# Altium footprint library PcbLib1.PcbLib: 9 footprints
Each footprint in its own frame and in the unit in brackets; x right, y up, seen from the top. Pads: shape width x height; smd on the part's side, far side on the other; paste and mask are expansions set on the pad; w line width, h text height; cw(c..) or ccw(c..) is an arc to the next point about the centre after c.
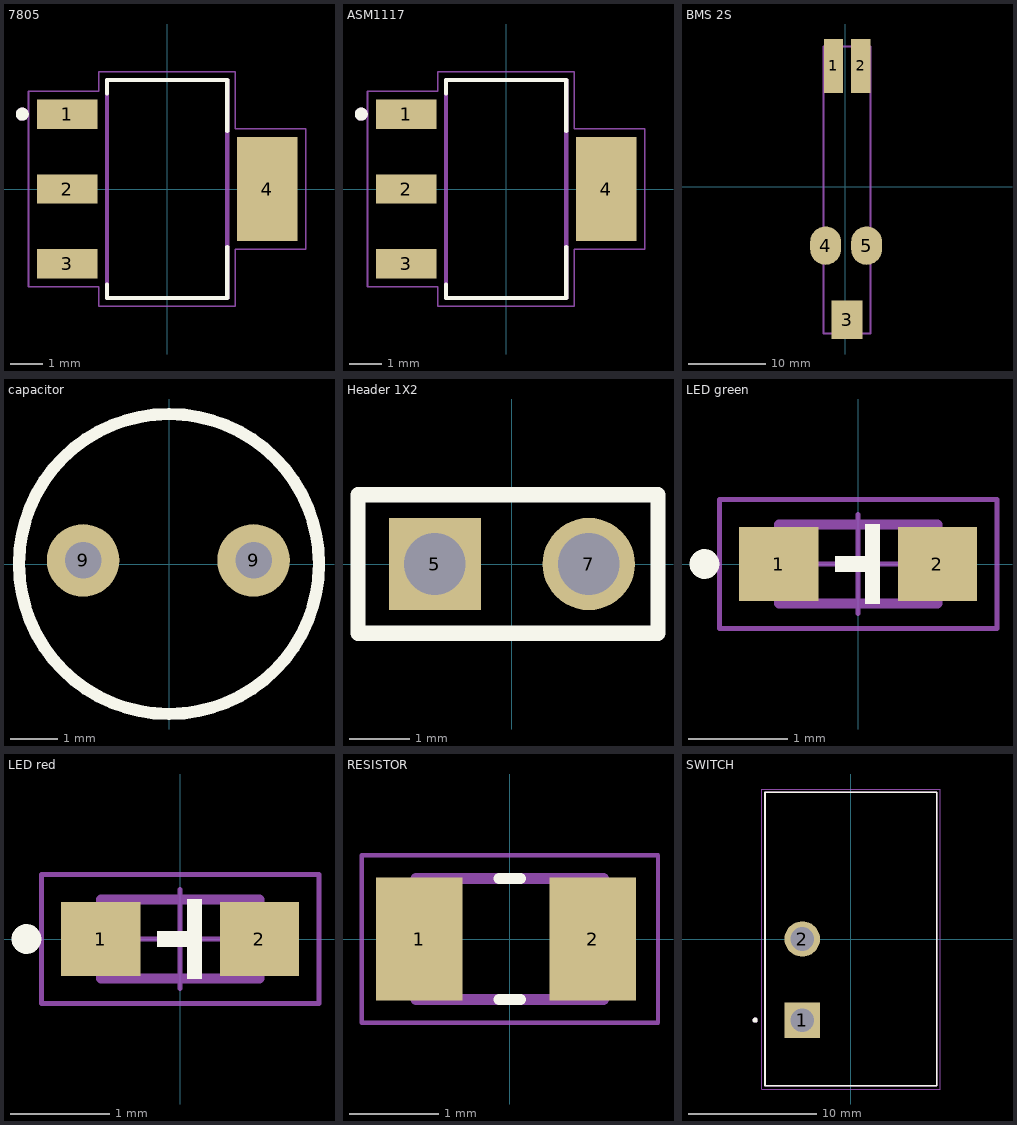
[diagram p0: the footprints below, top view; thin cyan lines are the x and y axes]

## 7805 [mm]
pads (4):
  rect 1.86x0.9 smd: 1(-3.075,2.3) 2(-3.075,0) 3(-3.075,-2.3)
  rect 1.86x3.19 smd: 4(3.075,0)
Top Overlay:
  circle w0.2: c-4.452,2.3 r0.1
  lines w0.127: -1.85,-2.933 -1.85,-3.35 1.85,-3.35 1.85,-1.779 ; -1.85,2.933 -1.85,3.35 1.85,3.35 1.85,1.779
Mechanical 13:
  circle w0.2: c-4.452,2.3 r0.1
  lines w0.127: -1.85,-3.35 1.85,-3.35 1.85,3.35 -1.85,3.35 -1.85,-3.35
Mechanical 15:
  lines w0.05: -4.26,-3 -2.1,-3 -2.1,-3.6 2.1,-3.6 2.1,-1.85 4.26,-1.85 4.26,1.85 2.1,1.85 2.1,3.6 -2.1,3.6 -2.1,3 -4.26,3 -4.26,-3
3D body "DCY0004A.stp": height 1.68, standoff 0, extent -3.601,-3.301 3.398,3.199

## ASM1117 [mm]
pads (4):
  rect 1.86x0.9 smd: 1(-3.075,2.3) 2(-3.075,0) 3(-3.075,-2.3)
  rect 1.86x3.19 smd: 4(3.075,0)
Top Overlay:
  circle w0.2: c-4.452,2.3 r0.1
  lines w0.127: -1.85,-2.933 -1.85,-3.35 1.85,-3.35 1.85,-1.779 ; -1.85,2.933 -1.85,3.35 1.85,3.35 1.85,1.779
Mechanical 13:
  circle w0.2: c-4.452,2.3 r0.1
  lines w0.127: -1.85,-3.35 -1.85,3.35 1.85,3.35 1.85,-3.35 -1.85,-3.35
Mechanical 15:
  lines w0.05: -4.26,-3 -4.26,3 -2.1,3 -2.1,3.6 2.1,3.6 2.1,1.85 4.26,1.85 4.26,-1.85 2.1,-1.85 2.1,-3.6 -2.1,-3.6 -2.1,-3 -4.26,-3
3D body "DCY0004A.stp": height 1.68, standoff 0, extent -3.576,-3.326 3.424,3.174

## BMS 2S [mm]
pads (5):
  rect 2.5x7 smd: 1(-1.524,15.748) 2(2.032,15.748)
  rect 4x5 smd: 3(0.254,-17.272)
  oval 4x5 smd: 4(-2.54,-7.62) 5(2.794,-7.62)
Mechanical 1:
  lines w0.254: -2.794,-19.05 3.302,-19.05 3.302,18.288 -2.794,18.288 -2.794,-19.05
  text "'.Designator" at 1.042,-18.313 h1.52

## capacitor [mil]
pads (2):
  round 60 hole 30: 9(-71,3) 9(70,3)
Top Overlay:
  circle w10: c0,0 r124.02
Mechanical 1:
  text "'.Designator" at -147,-23.01 h60
3D body "CAP_UES_8X11P5_NCH.step": height 492.6, standoff -172.01, extent -156.04,-154.75 160,160

## Header 1X2 [mil]
pads (2):
  rect 60x60 hole 40: 5(-50,0)
  round 60 hole 40: 7(50,0)
Top Overlay:
  lines w10: -100,-45 95,-45 95,45 -100,45 -100,-45
Mechanical 1:
  text "'.Designator" at -279,132.99 h60
3D body "640457-2.step": height 230, standoff -140, extent -100,-15 100,420

## LED green [mm] "SMD Mono-color Chip LED, body 1.6x0.8mm"
height 0.4
pads (2):
  rect 0.8x0.75 smd: 1(-0.8,0) 2(0.8,0)
Top Overlay:
  circle w0.15: c-1.55,0 r0.075
  region: 0.22,0.4 0.22,-0.4 0.07,-0.4 0.07,-0.08 -0.23,-0.08 -0.23,0.08 0.07,0.08 0.07,0.4
Top Courtyard:
  lines w0.05: -1.4,-0.65 -1.4,0.65 1.4,0.65 1.4,-0.65 -1.4,-0.65
Top Designator:
  text ".Designator" at -2.499,-0.167 h0.5
Top Component Outline:
  region: 0.22,0.4 0.22,-0.4 0.07,-0.4 0.07,-0.08 -0.23,-0.08 -0.23,0.08 0.07,0.08 0.07,0.4
  lines w0.1: -0.8,-0.4 -0.8,0.4 0.8,0.4 0.8,-0.4 -0.8,-0.4
Top Component Center:
  lines w0.05: -0.5,0 0.5,0 ; 0,-0.5 0,0.5
3D body "everlight-17-21-0805LED-GREEN.step": height 1.12, standoff 0.01, extent -1,-0.615 1,0.635

## LED red [mm] "SMD Mono-color Chip LED, body 1.6x0.8mm"
height 0.4
pads (2):
  rect 0.8x0.75 smd: 1(-0.8,0) 2(0.8,0)
Top Overlay:
  circle w0.15: c-1.55,0 r0.075
  region: 0.22,0.4 0.22,-0.4 0.07,-0.4 0.07,-0.08 -0.23,-0.08 -0.23,0.08 0.07,0.08 0.07,0.4
Top Courtyard:
  lines w0.05: -1.4,-0.65 -1.4,0.65 1.4,0.65 1.4,-0.65 -1.4,-0.65
Top Designator:
  text ".Designator" at -2.499,-0.167 h0.5
Top Component Outline:
  region: 0.22,0.4 0.22,-0.4 0.07,-0.4 0.07,-0.08 -0.23,-0.08 -0.23,0.08 0.07,0.08 0.07,0.4
  lines w0.1: -0.8,-0.4 -0.8,0.4 0.8,0.4 0.8,-0.4 -0.8,-0.4
Top Component Center:
  lines w0.05: -0.5,0 0.5,0 ; 0,-0.5 0,0.5
3D body "User Library-LED-0805-R.step": height 1.1, standoff 0, extent -1,-0.625 1,0.625

## RESISTOR [mm]
pads (2):
  rect 0.97x1.38 smd: 1(-1.016,0) 2(0.93,0)
Top Overlay:
  lines w0.127: -0.12,-0.68 0.12,-0.68 ; -0.12,0.68 0.12,0.68
Mechanical 1:
  text "'.Designator" at -8.865,-0.407 h1.52
Mechanical 13:
  lines w0.127: -1.05,-0.68 1.05,-0.68 1.05,0.68 -1.05,0.68 -1.05,-0.68
Mechanical 15:
  lines w0.05: -1.665,-0.94 1.665,-0.94 1.665,0.94 -1.665,0.94 -1.665,-0.94
3D body "User Library-CR2012-0805 (1).step": height 0.61, standoff 0.01, extent -1.016,-0.625 0.984,0.625

## SWITCH [mm]
height 18.41
pads (2):
  rect 2.775x2.775 / inner round 2.775 / far side rect 2.775x2.775 hole 1.85: 1(-3.81,-6.35)
  round 2.775 hole 1.85: 2(-3.81,0)
Top Overlay:
  circle w0.2: c-7.5,-6.35 r0.1
  lines w0.127: -6.73,-11.495 -6.73,11.495 6.73,11.495 6.73,-11.495 -6.73,-11.495
Mechanical 1:
  text "'.Designator" at -7.823,-2.439 h1.52
Mechanical 13:
  circle w0.2: c-7.5,-6.35 r0.1
  lines w0.127: -6.73,-11.495 -6.73,11.495 6.73,11.495 6.73,-11.495 -6.73,-11.495
Mechanical 15:
  lines w0.05: -6.98,-11.745 6.98,-11.745 6.98,11.745 -6.98,11.745 -6.98,-11.745
3D body "step_temp.STEP": height 18.41, standoff -3.56, extent -6.731,-11.493 6.731,11.493